# Altium footprint library WR-BHD.PcbLib: 220 footprints (part 11 of 14)
Each footprint in its own frame and in the unit in brackets; x right, y up, seen from the top. Pads: shape width x height; smd on the part's side, far side on the other; paste and mask are expansions set on the pad; w line width, h text height; cw(c..) or ccw(c..) is an arc to the next point about the centre after c.
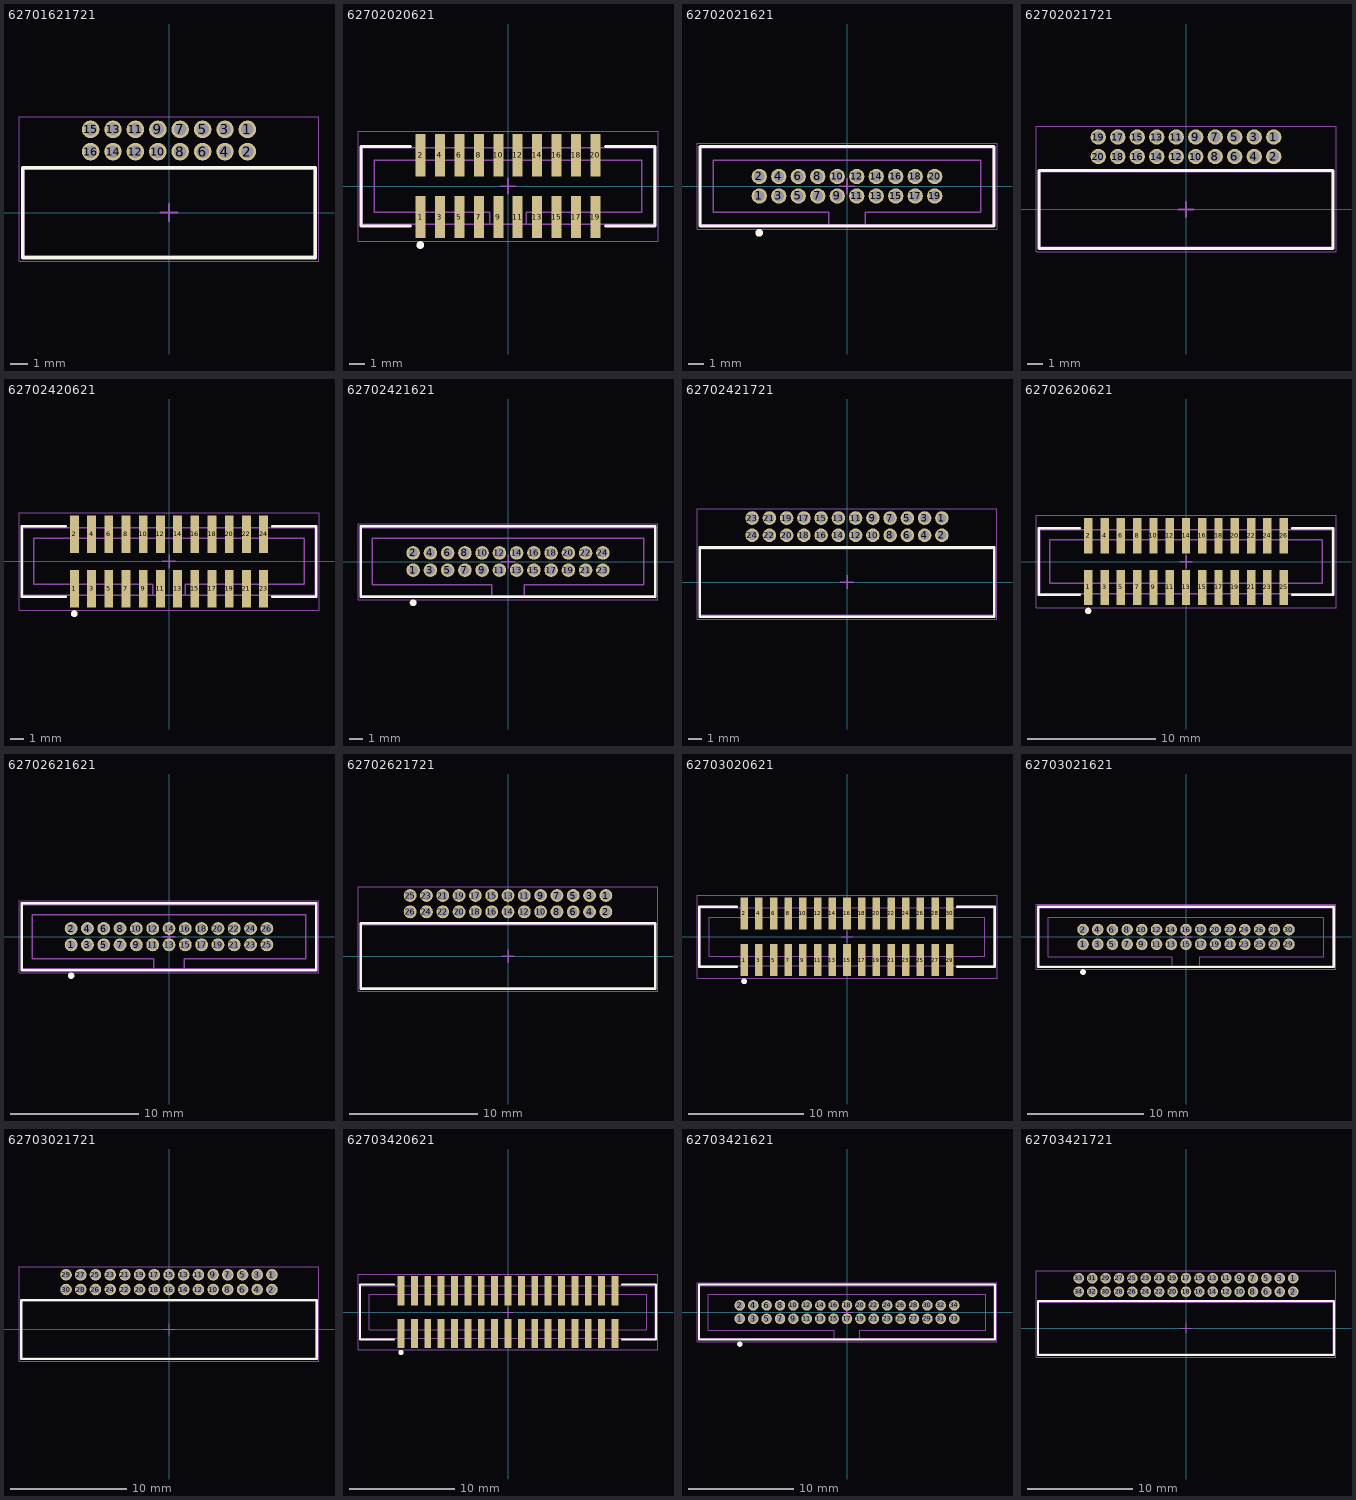
[diagram p10: the footprints below, top view; thin cyan lines are the x and y axes]

## 62701621721 [mm] "1.27x1.27mm Pitch Box Header Right Angle Type, 16p"
height 5
pads (16):
  round 1 hole 0.7: 1(4.445,4.72) 2(4.445,3.45) 3(3.175,4.72) 4(3.175,3.45) 5(1.905,4.72) 6(1.905,3.45) 7(0.635,4.72) 8(0.635,3.45) 9(-0.635,4.72) 10(-0.635,3.45) 11(-1.905,4.72) 12(-1.905,3.45) 13(-3.175,4.72) 14(-3.175,3.45) 15(-4.445,4.72) 16(-4.445,3.45)
Top Overlay:
  lines w0.2: -8.305,-2.55 -8.305,2.55 8.305,2.55 8.305,-2.55 -8.305,-2.55
Top Assembly:
  lines w0.1: -8.255,-2.45 8.255,-2.45 8.255,2.45 -8.255,2.45 -8.255,-2.45
Top Designator:
  text ".Designator" at -3.647,-0.357 h1
Top 3D Body:
  lines w0.1: -8.255,-2.45 -8.255,2.45 8.255,2.45 8.255,-2.45 -8.255,-2.45
Top Courtyard:
  lines w0.05: -8.505,-2.75 -8.505,5.42 8.505,5.42 8.505,-2.75 -8.505,-2.75
Top Component Center:
  lines w0.1: -0.5,0 0.5,0 ; 0,-0.5 0,0.5
3D body "62701621721.stp": height 5.08, standoff -2.37, extent -8.255,-2.45 8.255,4.92

## 62702020621 [mm] "Boc Header SMT type, 20p"
height 5.3
pads (20):
  rect 0.65x2.76 smd: 1(-5.715,-2.02) 2(-5.715,2.02) 3(-4.445,-2.02) 4(-4.445,2.02) 5(-3.175,-2.02) 6(-3.175,2.02) 7(-1.905,-2.02) 8(-1.905,2.02) 9(-0.635,-2.02) 10(-0.635,2.02) 11(0.635,-2.02) 12(0.635,2.02) 13(1.905,-2.02) 14(1.905,2.02) 15(3.175,-2.02) 16(3.175,2.02) 17(4.445,-2.02) 18(4.445,2.02) 19(5.715,-2.02) 20(5.715,2.02)
Top Overlay:
  circle w0.25: c-5.725,-3.85 r0.125
  lines w0.2: -6.375,-2.6 -9.6,-2.6 -9.6,2.6 -6.375,2.6 ; 6.375,-2.6 9.6,-2.6 9.6,2.6 6.375,2.6
Top Assembly:
  lines w0.1: -1.2,-2.5 -1.2,-1.7 -8.725,-1.7 -8.725,1.7 8.725,1.7 8.725,-1.7 1.2,-1.7 1.2,-2.5 ; -9.525,-2.5 -9.525,2.5 9.525,2.5 9.525,-2.5 -9.525,-2.5
Top Designator:
  text ".Designator" at -3.647,-0.357 h1
Top 3D Body:
  lines w0.1: -1.2,-2.5 -1.2,-1.7 -8.725,-1.7 -8.725,1.7 8.725,1.7 8.725,-1.7 1.2,-1.7 1.2,-2.5 ; -9.525,-2.5 9.525,-2.5 9.525,2.5 -9.525,2.5 -9.525,-2.5
Top Courtyard:
  lines w0.05: -9.8,-3.6 -9.8,3.6 9.8,3.6 9.8,-3.6 -9.8,-3.6
Top Component Center:
  lines w0.1: -0.5,0 0.5,0 ; 0,-0.5 0,0.5
3D body "62702020621.stp": height 5.2, standoff 0, extent -9.525,-2.8 9.525,2.8

## 62702021621 [mm] "1.27x1.27mm Pitch Box Header Straight Type, 20p"
height 4.9
pads (20):
  round 1 hole 0.7: 1(-5.715,-0.635) 2(-5.715,0.635) 3(-4.445,-0.635) 4(-4.445,0.635) 5(-3.175,-0.635) 6(-3.175,0.635) 7(-1.905,-0.635) 8(-1.905,0.635) 9(-0.635,-0.635) 10(-0.635,0.635) 11(0.635,-0.635) 12(0.635,0.635) 13(1.905,-0.635) 14(1.905,0.635) 15(3.175,-0.635) 16(3.175,0.635) 17(4.445,-0.635) 18(4.445,0.635) 19(5.715,-0.635) 20(5.715,0.635)
Top Overlay:
  circle w0.25: c-5.715,-3.035 r0.125
  lines w0.2: -9.575,-2.6 9.575,-2.6 9.575,2.6 -9.575,2.6 -9.575,-2.6
Top Assembly:
  lines w0.1: -1.2,-2.5 -1.2,-1.7 ; -1.2,-1.7 -8.725,-1.7 -8.725,1.7 8.725,1.7 8.725,-1.7 1.2,-1.7 ; 1.2,-2.5 1.2,-1.7 ; -9.525,-2.5 9.525,-2.5 9.525,2.5 -9.525,2.5 -9.525,-2.5
Top Designator:
  text ".Designator" at -3.647,-0.357 h1
Top 3D Body:
  lines w0.1: -1.2,-2.5 -1.2,-1.7 ; -1.2,-1.7 -8.725,-1.7 -8.725,1.7 8.725,1.7 8.725,-1.7 1.2,-1.7 ; 1.2,-2.5 1.2,-1.7 ; -9.525,-2.5 -9.525,2.5 9.525,2.5 9.525,-2.5 -9.525,-2.5
Top Courtyard:
  lines w0.05: -9.775,-2.8 9.775,-2.8 9.775,2.8 -9.775,2.8 -9.775,-2.8
Top Component Center:
  lines w0.1: -0.5,0 0.5,0 ; 0,-0.5 0,0.5
3D body "62702021621.stp": height 4.93, standoff -2.37, extent -9.525,-2.55 9.525,2.5

## 62702021721 [mm] "1.27x1.27mm Pitch Box Header Right Angle Type, 20p"
height 5
pads (20):
  round 1 hole 0.7: 1(5.715,4.72) 2(5.715,3.45) 3(4.445,4.72) 4(4.445,3.45) 5(3.175,4.72) 6(3.175,3.45) 7(1.905,4.72) 8(1.905,3.45) 9(0.635,4.72) 10(0.635,3.45) 11(-0.635,4.72) 12(-0.635,3.45) 13(-1.905,4.72) 14(-1.905,3.45) 15(-3.175,4.72) 16(-3.175,3.45) 17(-4.445,4.72) 18(-4.445,3.45) 19(-5.715,4.72) 20(-5.715,3.45)
Top Overlay:
  lines w0.2: -9.575,-2.55 -9.575,2.55 9.575,2.55 9.575,-2.55 -9.575,-2.55
Top Assembly:
  lines w0.1: -9.525,-2.45 9.525,-2.45 9.525,2.45 -9.525,2.45 -9.525,-2.45
Top Designator:
  text ".Designator" at -3.647,-0.357 h1
Top 3D Body:
  lines w0.1: -9.525,-2.45 -9.525,2.45 9.525,2.45 9.525,-2.45 -9.525,-2.45
Top Courtyard:
  lines w0.05: -9.775,-2.75 -9.775,5.42 9.775,5.42 9.775,-2.75 -9.775,-2.75
Top Component Center:
  lines w0.1: -0.5,0 0.5,0 ; 0,-0.5 0,0.5
3D body "62702021721.stp": height 5.08, standoff -2.37, extent -9.525,-2.45 9.525,4.92

## 62702420621 [mm] "Boc Header SMT type, 24p"
height 5.3
pads (24):
  rect 0.65x2.76 smd: 1(-6.985,-2.02) 2(-6.985,2.02) 3(-5.715,-2.02) 4(-5.715,2.02) 5(-4.445,-2.02) 6(-4.445,2.02) 7(-3.175,-2.02) 8(-3.175,2.02) 9(-1.905,-2.02) 10(-1.905,2.02) 11(-0.635,-2.02) 12(-0.635,2.02) 13(0.635,-2.02) 14(0.635,2.02) 15(1.905,-2.02) 16(1.905,2.02) 17(3.175,-2.02) 18(3.175,2.02) 19(4.445,-2.02) 20(4.445,2.02) 21(5.715,-2.02) 22(5.715,2.02) 23(6.985,-2.02) 24(6.985,2.02)
Top Overlay:
  circle w0.25: c-6.995,-3.85 r0.125
  lines w0.2: -7.645,-2.6 -10.87,-2.6 -10.87,2.6 -7.645,2.6 ; 7.645,-2.6 10.87,-2.6 10.87,2.6 7.645,2.6
Top Assembly:
  lines w0.1: -1.2,-2.5 -1.2,-1.7 -9.995,-1.7 -9.995,1.7 9.995,1.7 9.995,-1.7 1.2,-1.7 1.2,-2.5 ; -10.795,-2.5 -10.795,2.5 10.795,2.5 10.795,-2.5 -10.795,-2.5
Top Designator:
  text ".Designator" at -3.647,-0.357 h1
Top 3D Body:
  lines w0.1: -1.2,-2.5 -1.2,-1.7 -9.995,-1.7 -9.995,1.7 9.995,1.7 9.995,-1.7 1.2,-1.7 1.2,-2.5 ; -10.795,-2.5 10.795,-2.5 10.795,2.5 -10.795,2.5 -10.795,-2.5
Top Courtyard:
  lines w0.05: -11.07,-3.6 -11.07,3.6 11.07,3.6 11.07,-3.6 -11.07,-3.6
Top Component Center:
  lines w0.1: -0.5,0 0.5,0 ; 0,-0.5 0,0.5
3D body "62702420621.stp": height 5.2, standoff -0.04, extent -10.795,-2.8 10.795,2.8

## 62702421621 [mm] "1.27x1.27mm Pitch Box Header Straight Type, 24p"
height 4.9
pads (24):
  round 1 hole 0.7: 1(-6.985,-0.635) 2(-6.985,0.635) 3(-5.715,-0.635) 4(-5.715,0.635) 5(-4.445,-0.635) 6(-4.445,0.635) 7(-3.175,-0.635) 8(-3.175,0.635) 9(-1.905,-0.635) 10(-1.905,0.635) 11(-0.635,-0.635) 12(-0.635,0.635) 13(0.635,-0.635) 14(0.635,0.635) 15(1.905,-0.635) 16(1.905,0.635) 17(3.175,-0.635) 18(3.175,0.635) 19(4.445,-0.635) 20(4.445,0.635) 21(5.715,-0.635) 22(5.715,0.635) 23(6.985,-0.635) 24(6.985,0.635)
Top Overlay:
  circle w0.25: c-6.985,-3.035 r0.125
  lines w0.2: -10.845,-2.6 10.845,-2.6 10.845,2.6 -10.845,2.6 -10.845,-2.6
Top Assembly:
  lines w0.1: -1.2,-2.5 -1.2,-1.7 ; -1.2,-1.7 -9.995,-1.7 -9.995,1.7 9.995,1.7 9.995,-1.7 1.2,-1.7 ; 1.2,-2.5 1.2,-1.7 ; -10.795,-2.5 10.795,-2.5 10.795,2.5 -10.795,2.5 -10.795,-2.5
Top Designator:
  text ".Designator" at -3.647,-0.357 h1
Top 3D Body:
  lines w0.1: -1.2,-2.5 -1.2,-1.7 ; -1.2,-1.7 -9.995,-1.7 -9.995,1.7 9.995,1.7 9.995,-1.7 1.2,-1.7 ; 1.2,-2.5 1.2,-1.7 ; -10.795,-2.5 -10.795,2.5 10.795,2.5 10.795,-2.5 -10.795,-2.5
Top Courtyard:
  lines w0.05: -11.045,-2.8 11.045,-2.8 11.045,2.8 -11.045,2.8 -11.045,-2.8
Top Component Center:
  lines w0.1: -0.5,0 0.5,0 ; 0,-0.5 0,0.5
3D body "62702421621.stp": height 4.93, standoff -2.37, extent -10.795,-2.55 10.795,2.5

## 62702421721 [mm] "1.27x1.27mm Pitch Box Header Right Angle Type, 24p"
height 5
pads (24):
  round 1 hole 0.7: 1(6.985,4.72) 2(6.985,3.45) 3(5.715,4.72) 4(5.715,3.45) 5(4.445,4.72) 6(4.445,3.45) 7(3.175,4.72) 8(3.175,3.45) 9(1.905,4.72) 10(1.905,3.45) 11(0.635,4.72) 12(0.635,3.45) 13(-0.635,4.72) 14(-0.635,3.45) 15(-1.905,4.72) 16(-1.905,3.45) 17(-3.175,4.72) 18(-3.175,3.45) 19(-4.445,4.72) 20(-4.445,3.45) 21(-5.715,4.72) 22(-5.715,3.45) 23(-6.985,4.72) 24(-6.985,3.45)
Top Overlay:
  lines w0.2: -10.845,-2.55 10.845,-2.55 10.845,2.55 -10.845,2.55 -10.845,-2.55
Top Assembly:
  lines w0.1: -10.795,-2.45 -10.795,2.45 10.795,2.45 10.795,-2.45 -10.795,-2.45
Top Designator:
  text ".Designator" at -3.647,-0.357 h1
Top 3D Body:
  lines w0.1: -10.795,-2.45 10.795,-2.45 10.795,2.45 -10.795,2.45 -10.795,-2.45
Top Courtyard:
  lines w0.05: -11.045,-2.75 11.045,-2.75 11.045,5.42 -11.045,5.42 -11.045,-2.75
Top Component Center:
  lines w0.1: -0.5,0 0.5,0 ; 0,-0.5 0,0.5
3D body "62702421721.stp": height 5.08, standoff -2.37, extent -10.795,-2.45 10.795,4.92

## 62702620621 [mm] "Boc Header SMT type, 26p"
height 5.3
pads (26):
  rect 0.65x2.76 smd: 1(-7.62,-2.02) 2(-7.62,2.02) 3(-6.35,-2.02) 4(-6.35,2.02) 5(-5.08,-2.02) 6(-5.08,2.02) 7(-3.81,-2.02) 8(-3.81,2.02) 9(-2.54,-2.02) 10(-2.54,2.02) 11(-1.27,-2.02) 12(-1.27,2.02) 13(0,-2.02) 14(0,2.02) 15(1.27,-2.02) 16(1.27,2.02) 17(2.54,-2.02) 18(2.54,2.02) 19(3.81,-2.02) 20(3.81,2.02) 21(5.08,-2.02) 22(5.08,2.02) 23(6.35,-2.02) 24(6.35,2.02) 25(7.62,-2.02) 26(7.62,2.02)
Top Overlay:
  circle w0.25: c-7.63,-3.85 r0.125
  lines w0.2: -8.28,-2.6 -11.505,-2.6 -11.505,2.6 -8.28,2.6 ; 8.28,-2.6 11.505,-2.6 11.505,2.6 8.28,2.6
Top Assembly:
  lines w0.1: -1.2,-2.5 -1.2,-1.7 -10.63,-1.7 -10.63,1.7 10.63,1.7 10.63,-1.7 1.2,-1.7 1.2,-2.5 ; -11.43,-2.5 -11.43,2.5 11.43,2.5 11.43,-2.5 -11.43,-2.5
Top Designator:
  text ".Designator" at -3.647,-0.357 h1
Top 3D Body:
  lines w0.1: -1.2,-2.5 -1.2,-1.7 -10.63,-1.7 -10.63,1.7 10.63,1.7 10.63,-1.7 1.2,-1.7 1.2,-2.5 ; -11.43,-2.5 11.43,-2.5 11.43,2.5 -11.43,2.5 -11.43,-2.5
Top Courtyard:
  lines w0.05: -11.705,-3.6 -11.705,3.6 11.705,3.6 11.705,-3.6 -11.705,-3.6
Top Component Center:
  lines w0.1: -0.5,0 0.5,0 ; 0,-0.5 0,0.5
3D body "62702620621.stp": height 5.2, standoff 0, extent -11.43,-2.8 11.43,2.8

## 62702621621 [mm] "1.27x1.27mm Pitch Box Header Straight Type, 26p"
height 4.9
pads (26):
  round 1 hole 0.7: 1(-7.62,-0.635) 2(-7.62,0.635) 3(-6.35,-0.635) 4(-6.35,0.635) 5(-5.08,-0.635) 6(-5.08,0.635) 7(-3.81,-0.635) 8(-3.81,0.635) 9(-2.54,-0.635) 10(-2.54,0.635) 11(-1.27,-0.635) 12(-1.27,0.635) 13(0,-0.635) 14(0,0.635) 15(1.27,-0.635) 16(1.27,0.635) 17(2.54,-0.635) 18(2.54,0.635) 19(3.81,-0.635) 20(3.81,0.635) 21(5.08,-0.635) 22(5.08,0.635) 23(6.35,-0.635) 24(6.35,0.635) 25(7.62,-0.635) 26(7.62,0.635)
Top Overlay:
  circle w0.25: c-7.62,-3.035 r0.125
  lines w0.2: -11.48,-2.6 -11.48,2.6 11.48,2.6 11.48,-2.6 -11.48,-2.6
Top Assembly:
  lines w0.1: -1.2,-2.5 -1.2,-1.7 ; -1.2,-1.7 -10.63,-1.7 -10.63,1.7 10.63,1.7 10.63,-1.7 1.2,-1.7 ; 1.2,-2.5 1.2,-1.7 ; -11.43,-2.5 -11.43,2.5 11.43,2.5 11.43,-2.5 -11.43,-2.5
Top Designator:
  text ".Designator" at -3.647,-0.357 h1
Top 3D Body:
  lines w0.1: -1.2,-2.5 -1.2,-1.7 ; -1.2,-1.7 -10.63,-1.7 -10.63,1.7 10.63,1.7 10.63,-1.7 1.2,-1.7 ; 1.2,-2.5 1.2,-1.7 ; -11.43,-2.5 11.43,-2.5 11.43,2.5 -11.43,2.5 -11.43,-2.5
Top Courtyard:
  lines w0.05: -11.68,-2.8 -11.68,2.8 11.68,2.8 11.68,-2.8 -11.68,-2.8
Top Component Center:
  lines w0.1: -0.5,0 0.5,0 ; 0,-0.5 0,0.5
3D body "62702621621.stp": height 4.93, standoff -2.37, extent -11.43,-2.55 11.43,2.5

## 62702621721 [mm] "1.27x1.27mm Pitch Box Header Right Angle Type, 26p"
height 5
pads (26):
  round 1 hole 0.7: 1(7.62,4.72) 2(7.62,3.45) 3(6.35,4.72) 4(6.35,3.45) 5(5.08,4.72) 6(5.08,3.45) 7(3.81,4.72) 8(3.81,3.45) 9(2.54,4.72) 10(2.54,3.45) 11(1.27,4.72) 12(1.27,3.45) 13(0,4.72) 14(0,3.45) 15(-1.27,4.72) 16(-1.27,3.45) 17(-2.54,4.72) 18(-2.54,3.45) 19(-3.81,4.72) 20(-3.81,3.45) 21(-5.08,4.72) 22(-5.08,3.45) 23(-6.35,4.72) 24(-6.35,3.45) 25(-7.62,4.72) 26(-7.62,3.45)
Top Overlay:
  lines w0.2: -11.48,-2.55 -11.48,2.55 11.48,2.55 11.48,-2.55 -11.48,-2.55
Top Assembly:
  lines w0.1: -11.43,-2.45 11.43,-2.45 11.43,2.45 -11.43,2.45 -11.43,-2.45
Top Designator:
  text ".Designator" at -3.647,-0.357 h1
Top 3D Body:
  lines w0.1: -11.43,-2.45 -11.43,2.45 11.43,2.45 11.43,-2.45 -11.43,-2.45
Top Courtyard:
  lines w0.05: -11.68,-2.75 -11.68,5.42 11.68,5.42 11.68,-2.75 -11.68,-2.75
Top Component Center:
  lines w0.1: -0.5,0 0.5,0 ; 0,-0.5 0,0.5
3D body "62702621721.stp": height 5.08, standoff -2.37, extent -11.43,-2.45 11.43,4.92

## 62703020621 [mm] "Boc Header SMT type, 30p"
height 5.3
pads (30):
  rect 0.65x2.76 smd: 1(-8.89,-2.02) 2(-8.89,2.02) 3(-7.62,-2.02) 4(-7.62,2.02) 5(-6.35,-2.02) 6(-6.35,2.02) 7(-5.08,-2.02) 8(-5.08,2.02) 9(-3.81,-2.02) 10(-3.81,2.02) 11(-2.54,-2.02) 12(-2.54,2.02) 13(-1.27,-2.02) 14(-1.27,2.02) 15(0,-2.02) 16(0,2.02) 17(1.27,-2.02) 18(1.27,2.02) 19(2.54,-2.02) 20(2.54,2.02) 21(3.81,-2.02) 22(3.81,2.02) 23(5.08,-2.02) 24(5.08,2.02) 25(6.35,-2.02) 26(6.35,2.02) 27(7.62,-2.02) 28(7.62,2.02) 29(8.89,-2.02) 30(8.89,2.02)
Top Overlay:
  circle w0.25: c-8.9,-3.85 r0.125
  lines w0.2: -9.55,-2.6 -12.775,-2.6 -12.775,2.6 -9.55,2.6 ; 9.55,-2.6 12.775,-2.6 12.775,2.6 9.55,2.6
Top Assembly:
  lines w0.1: -1.2,-2.5 -1.2,-1.7 -11.9,-1.7 -11.9,1.7 11.9,1.7 11.9,-1.7 1.2,-1.7 1.2,-2.5 ; -12.7,-2.5 12.7,-2.5 12.7,2.5 -12.7,2.5 -12.7,-2.5
Top Designator:
  text ".Designator" at -3.647,-0.357 h1
Top 3D Body:
  lines w0.1: -1.2,-2.5 -1.2,-1.7 -11.9,-1.7 -11.9,1.7 11.9,1.7 11.9,-1.7 1.2,-1.7 1.2,-2.5 ; -12.7,-2.5 -12.7,2.5 12.7,2.5 12.7,-2.5 -12.7,-2.5
Top Courtyard:
  lines w0.05: -12.975,-3.6 12.975,-3.6 12.975,3.6 -12.975,3.6 -12.975,-3.6
Top Component Center:
  lines w0.1: -0.5,0 0.5,0 ; 0,-0.5 0,0.5
3D body "62703020621.stp": height 5.2, standoff 0, extent -12.7,-2.8 12.7,2.8

## 62703021621 [mm] "1.27x1.27mm Pitch Box Header Straight Type, 30p"
height 4.9
pads (30):
  round 1 hole 0.7: 1(-8.89,-0.635) 2(-8.89,0.635) 3(-7.62,-0.635) 4(-7.62,0.635) 5(-6.35,-0.635) 6(-6.35,0.635) 7(-5.08,-0.635) 8(-5.08,0.635) 9(-3.81,-0.635) 10(-3.81,0.635) 11(-2.54,-0.635) 12(-2.54,0.635) 13(-1.27,-0.635) 14(-1.27,0.635) 15(0,-0.635) 16(0,0.635) 17(1.27,-0.635) 18(1.27,0.635) 19(2.54,-0.635) 20(2.54,0.635) 21(3.81,-0.635) 22(3.81,0.635) 23(5.08,-0.635) 24(5.08,0.635) 25(6.35,-0.635) 26(6.35,0.635) 27(7.62,-0.635) 28(7.62,0.635) 29(8.89,-0.635) 30(8.89,0.635)
Top Overlay:
  circle w0.25: c-8.89,-3.035 r0.125
  lines w0.2: -12.75,-2.6 -12.75,2.6 12.75,2.6 12.75,-2.6 -12.75,-2.6
Top Assembly:
  lines w0.1: -1.2,-2.5 -1.2,-1.7 ; -1.2,-1.7 -11.9,-1.7 -11.9,1.7 11.9,1.7 11.9,-1.7 1.2,-1.7 ; 1.2,-2.5 1.2,-1.7 ; -12.7,-2.5 -12.7,2.5 12.7,2.5 12.7,-2.5 -12.7,-2.5
Top Designator:
  text ".Designator" at -3.647,-0.357 h1
Top 3D Body:
  lines w0.1: -1.2,-2.5 -1.2,-1.7 ; -1.2,-1.7 -11.9,-1.7 -11.9,1.7 11.9,1.7 11.9,-1.7 1.2,-1.7 ; 1.2,-2.5 1.2,-1.7 ; -12.7,-2.5 12.7,-2.5 12.7,2.5 -12.7,2.5 -12.7,-2.5
Top Courtyard:
  lines w0.05: -12.95,-2.8 -12.95,2.8 12.95,2.8 12.95,-2.8 -12.95,-2.8
Top Component Center:
  lines w0.1: -0.5,0 0.5,0 ; 0,-0.5 0,0.5
3D body "62703021621.stp": height 4.93, standoff -2.37, extent -12.7,-2.55 12.7,2.5

## 62703021721 [mm] "1.27x1.27mm Pitch Box Header Right Angle Type, 30p"
height 5
pads (30):
  round 1 hole 0.7: 1(8.89,4.72) 2(8.89,3.45) 3(7.62,4.72) 4(7.62,3.45) 5(6.35,4.72) 6(6.35,3.45) 7(5.08,4.72) 8(5.08,3.45) 9(3.81,4.72) 10(3.81,3.45) 11(2.54,4.72) 12(2.54,3.45) 13(1.27,4.72) 14(1.27,3.45) 15(0,4.72) 16(0,3.45) 17(-1.27,4.72) 18(-1.27,3.45) 19(-2.54,4.72) 20(-2.54,3.45) 21(-3.81,4.72) 22(-3.81,3.45) 23(-5.08,4.72) 24(-5.08,3.45) 25(-6.35,4.72) 26(-6.35,3.45) 27(-7.62,4.72) 28(-7.62,3.45) 29(-8.89,4.72) 30(-8.89,3.45)
Top Overlay:
  lines w0.2: -12.75,-2.55 12.75,-2.55 12.75,2.55 -12.75,2.55 -12.75,-2.55
Top Assembly:
  lines w0.1: -12.7,-2.45 -12.7,2.45 12.7,2.45 12.7,-2.45 -12.7,-2.45
Top Designator:
  text ".Designator" at -3.647,-0.357 h1
Top 3D Body:
  lines w0.1: -12.7,-2.45 12.7,-2.45 12.7,2.45 -12.7,2.45 -12.7,-2.45
Top Courtyard:
  lines w0.05: -12.95,-2.75 12.95,-2.75 12.95,5.42 -12.95,5.42 -12.95,-2.75
Top Component Center:
  lines w0.1: -0.5,0 0.5,0 ; 0,-0.5 0,0.5
3D body "62703021721.stp": height 5.08, standoff -2.37, extent -12.7,-2.45 12.7,4.92

## 62703420621 [mm] "Boc Header SMT type, 34p"
height 5.3
pads (34):
  rect 0.65x2.76 smd: 1(-10.16,-2.02) 2(-10.16,2.02) 3(-8.89,-2.02) 4(-8.89,2.02) 5(-7.62,-2.02) 6(-7.62,2.02) 7(-6.35,-2.02) 8(-6.35,2.02) 9(-5.08,-2.02) 10(-5.08,2.02) 11(-3.81,-2.02) 12(-3.81,2.02) 13(-2.54,-2.02) 14(-2.54,2.02) 15(-1.27,-2.02) 16(-1.27,2.02) 17(0,-2.02) 18(0,2.02) 19(1.27,-2.02) 20(1.27,2.02) 21(2.54,-2.02) 22(2.54,2.02) 23(3.81,-2.02) 24(3.81,2.02) 25(5.08,-2.02) 26(5.08,2.02) 27(6.35,-2.02) 28(6.35,2.02) 29(7.62,-2.02) 30(7.62,2.02) 31(8.89,-2.02) 32(8.89,2.02) 33(10.16,-2.02) 34(10.16,2.02)
Top Overlay:
  circle w0.25: c-10.17,-3.85 r0.125
  lines w0.2: -10.82,-2.6 -14.045,-2.6 -14.045,2.6 -10.82,2.6 ; 10.82,-2.6 14.045,-2.6 14.045,2.6 10.82,2.6
Top Assembly:
  lines w0.1: -1.2,-2.5 -1.2,-1.7 -13.17,-1.7 -13.17,1.7 13.17,1.7 13.17,-1.7 1.2,-1.7 1.2,-2.5 ; -13.97,-2.5 13.97,-2.5 13.97,2.5 -13.97,2.5 -13.97,-2.5
Top Designator:
  text ".Designator" at -3.647,-0.357 h1
Top 3D Body:
  lines w0.1: -1.2,-2.5 -1.2,-1.7 -13.17,-1.7 -13.17,1.7 13.17,1.7 13.17,-1.7 1.2,-1.7 1.2,-2.5 ; -13.97,-2.5 -13.97,2.5 13.97,2.5 13.97,-2.5 -13.97,-2.5
Top Courtyard:
  lines w0.05: -14.245,-3.6 14.245,-3.6 14.245,3.6 -14.245,3.6 -14.245,-3.6
Top Component Center:
  lines w0.1: -0.5,0 0.5,0 ; 0,-0.5 0,0.5
3D body "62703420621.stp": height 5.2, standoff 0, extent -13.97,-2.8 13.97,2.8

## 62703421621 [mm] "1.27x1.27mm Pitch Box Header Straight Type, 34p"
height 4.9
pads (34):
  round 1 hole 0.7: 1(-10.16,-0.635) 2(-10.16,0.635) 3(-8.89,-0.635) 4(-8.89,0.635) 5(-7.62,-0.635) 6(-7.62,0.635) 7(-6.35,-0.635) 8(-6.35,0.635) 9(-5.08,-0.635) 10(-5.08,0.635) 11(-3.81,-0.635) 12(-3.81,0.635) 13(-2.54,-0.635) 14(-2.54,0.635) 15(-1.27,-0.635) 16(-1.27,0.635) 17(0,-0.635) 18(0,0.635) 19(1.27,-0.635) 20(1.27,0.635) 21(2.54,-0.635) 22(2.54,0.635) 23(3.81,-0.635) 24(3.81,0.635) 25(5.08,-0.635) 26(5.08,0.635) 27(6.35,-0.635) 28(6.35,0.635) 29(7.62,-0.635) 30(7.62,0.635) 31(8.89,-0.635) 32(8.89,0.635) 33(10.16,-0.635) 34(10.16,0.635)
Top Overlay:
  circle w0.25: c-10.16,-3.035 r0.125
  lines w0.2: -14.02,-2.6 14.02,-2.6 14.02,2.6 -14.02,2.6 -14.02,-2.6
Top Assembly:
  lines w0.1: -1.2,-2.5 -1.2,-1.7 ; -1.2,-1.7 -13.17,-1.7 -13.17,1.7 13.17,1.7 13.17,-1.7 1.2,-1.7 ; 1.2,-2.5 1.2,-1.7 ; -13.97,-2.5 13.97,-2.5 13.97,2.5 -13.97,2.5 -13.97,-2.5
Top Designator:
  text ".Designator" at -3.647,-0.357 h1
Top 3D Body:
  lines w0.1: -1.2,-2.5 -1.2,-1.7 ; -1.2,-1.7 -13.17,-1.7 -13.17,1.7 13.17,1.7 13.17,-1.7 1.2,-1.7 ; 1.2,-2.5 1.2,-1.7 ; -13.97,-2.5 -13.97,2.5 13.97,2.5 13.97,-2.5 -13.97,-2.5
Top Courtyard:
  lines w0.05: -14.22,-2.8 14.22,-2.8 14.22,2.8 -14.22,2.8 -14.22,-2.8
Top Component Center:
  lines w0.1: -0.5,0 0.5,0 ; 0,-0.5 0,0.5
3D body "62703421621.stp": height 4.93, standoff -2.37, extent -13.97,-2.55 13.97,2.5

## 62703421721 [mm] "1.27x1.27mm Pitch Box Header Right Angle Type, 34p"
height 5
pads (34):
  round 1 hole 0.7: 1(10.16,4.72) 2(10.16,3.45) 3(8.89,4.72) 4(8.89,3.45) 5(7.62,4.72) 6(7.62,3.45) 7(6.35,4.72) 8(6.35,3.45) 9(5.08,4.72) 10(5.08,3.45) 11(3.81,4.72) 12(3.81,3.45) 13(2.54,4.72) 14(2.54,3.45) 15(1.27,4.72) 16(1.27,3.45) 17(0,4.72) 18(0,3.45) 19(-1.27,4.72) 20(-1.27,3.45) 21(-2.54,4.72) 22(-2.54,3.45) 23(-3.81,4.72) 24(-3.81,3.45) 25(-5.08,4.72) 26(-5.08,3.45) 27(-6.35,4.72) 28(-6.35,3.45) 29(-7.62,4.72) 30(-7.62,3.45) 31(-8.89,4.72) 32(-8.89,3.45) 33(-10.16,4.72) 34(-10.16,3.45)
Top Overlay:
  lines w0.2: -14.02,-2.55 14.02,-2.55 14.02,2.55 -14.02,2.55 -14.02,-2.55
Top Assembly:
  lines w0.1: -13.97,-2.45 -13.97,2.45 13.97,2.45 13.97,-2.45 -13.97,-2.45
Top Designator:
  text ".Designator" at -3.647,-0.357 h1
Top 3D Body:
  lines w0.1: -13.97,-2.45 13.97,-2.45 13.97,2.45 -13.97,2.45 -13.97,-2.45
Top Courtyard:
  lines w0.05: -14.22,-2.75 14.22,-2.75 14.22,5.42 -14.22,5.42 -14.22,-2.75
Top Component Center:
  lines w0.1: -0.5,0 0.5,0 ; 0,-0.5 0,0.5
3D body "62703421721.stp": height 5.08, standoff -2.37, extent -13.97,-2.45 13.97,4.92